# Altium integrated library SL2.1A.IntLib: 1 symbol
Pins are listed as number, name and electrical type; pins without a type are passive.

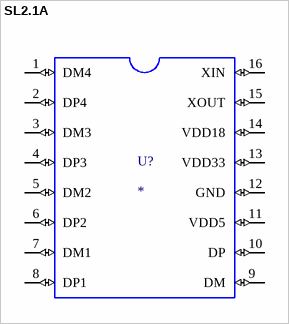
[diagram p0: symbol SL2.1A]

## SL2.1A
designator U?
USB 2.0 HIGH SPEED 4-PORT HUB CONTROLLER; MF: CoreChips ShenZhen CO.,Ltd; MP: SL2.1A; SnapEDA_Link: https://www.snapeda.com/parts/SL2.1A/CoreChips+ShenZhen+CO.%252CLtd/view-part/?ref=snap; Package: Package; Value: *; Check_prices: https://www.snapeda.com/parts/SL2.1A/CoreChips+ShenZhen+CO.%252CLtd/view-part/?ref=eda
footprint SO16
pins: 1 DM4 (io), 2 DP4 (io), 3 DM3 (io), 4 DP3 (io), 5 DM2 (io), 6 DP2 (io), 7 DM1 (io), 8 DP1 (io), 9 DM (io), 10 DP (io), 11 VDD5 (io), 12 GND (io), 13 VDD33 (io), 14 VDD18 (io), 15 XOUT (io), 16 XIN (io)